# Altium schematic symbol library MicroProcessor.SchLib: 9 symbols (part 2 of 4)
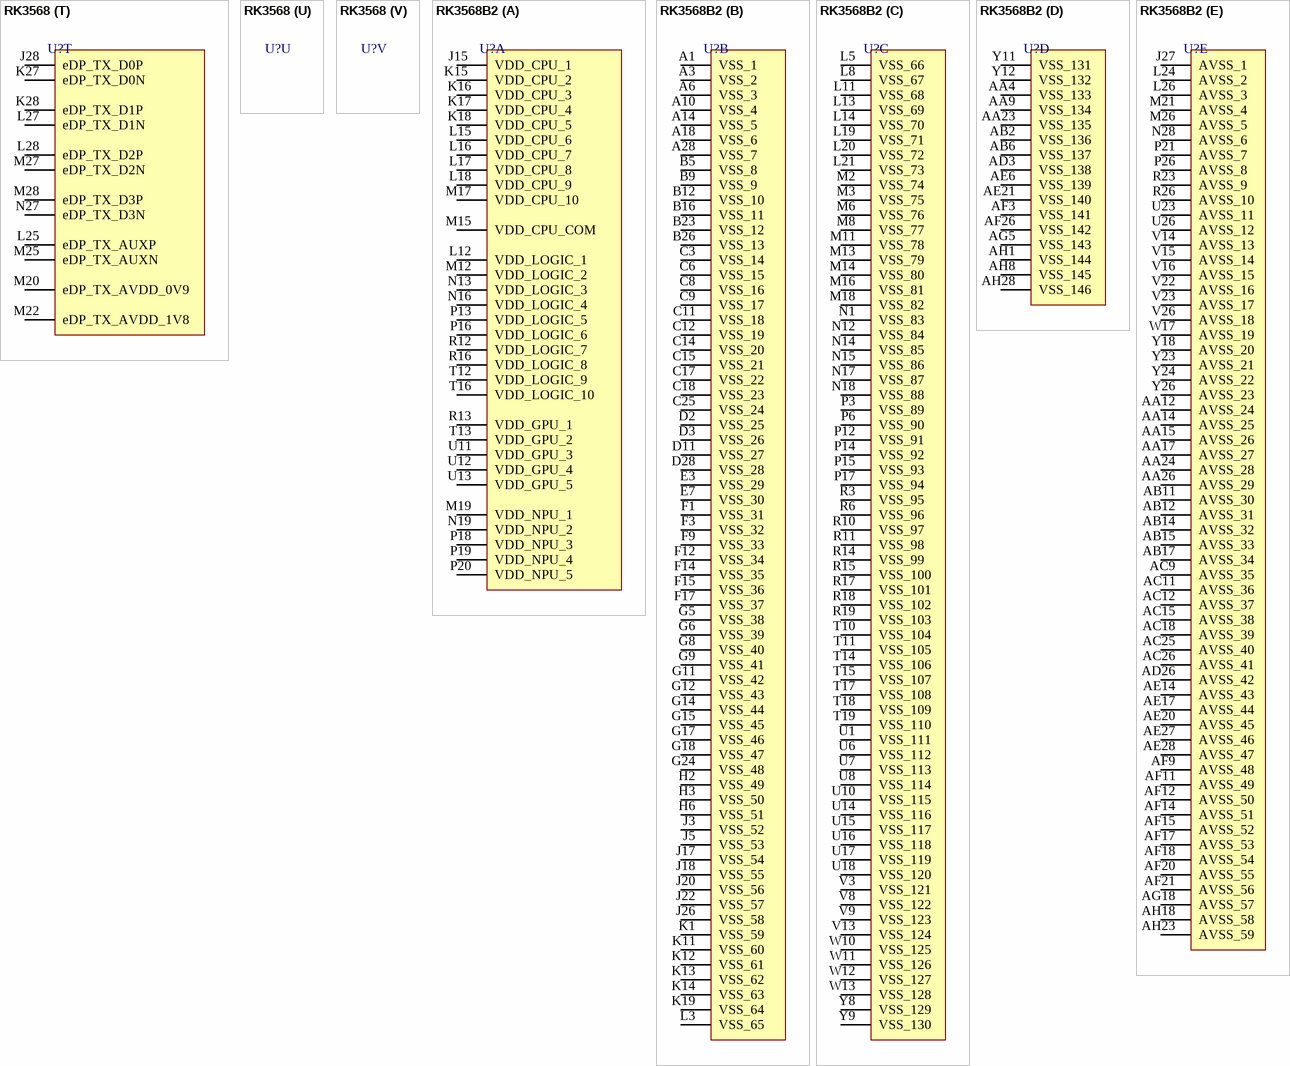
[diagram p30: symbols RK3568 to RK3568B2]

## RK3568
designator U?
RK3568 Power Management IC; Manufacturer: Rockchip; Manufacturer Part Number: RK3568; Package: FCBGA636L; Item Type: IC
part A pins: J15  VDD_CPU_1 , K15  VDD_CPU_2, K16 VDD_CPU_3, K17 VDD_CPU_4, K18 VDD_CPU_5, L12 VDD_LOGIC_1, L15 VDD_CPU_6, L16 VDD_CPU_7, L17 VDD_CPU_8, L18 VDD_CPU_9, M12 VDD_LOGIC_2, M15 VDD_CPU_COM, M17 VDD_CPU_10, M19 VDD_NPU_1, N13 VDD_LOGIC_3, N16 VDD_LOGIC_4, N19 VDD_NPU_2, P13 VDD_LOGIC_5, P16 VDD_LOGIC_6, P18 VDD_NPU_3, P19 VDD_NPU_4, P20 VDD_NPU_5, R12 VDD_LOGIC_7, R13 VDD_GPU_1, R16 VDD_LOGIC_8, T12 VDD_LOGIC_9, T13 VDD_GPU_2, T16 VDD_LOGIC_10, U11 VDD_GPU_3, U12 VDD_GPU_4, U13 VDD_GPU_5
part B pins: A1 VSS_1, A3 VSS_2, A6 VSS_3, A10 VSS_4, A14 VSS_5, A18 VSS_6, A28 VSS_7, B5 VSS_8, B9 VSS_9, B12 VSS_10, B16 VSS_11, B23 VSS_12, B26 VSS_13, C3 VSS_14, C6 VSS_15, C8 VSS_16, C9 VSS_17, C11 VSS_18, C12 VSS_19, C14 VSS_20, C15 VSS_21, C17 VSS_22, C18 VSS_23, C25 VSS_24, D2 VSS_25, D3 VSS_26, D11 VSS_27, D28 VSS_28, E3 VSS_29, E7 VSS_30, F1 VSS_31, F3 VSS_32, F9 VSS_33, F12 VSS_34, F14 VSS_35, F15 VSS_36, F17 VSS_37, G5 VSS_38, G6 VSS_39, G8 VSS_40, G9 VSS_41, G11 VSS_42, G12 VSS_43, G14 VSS_44, G15 VSS_45, G17 VSS_46, G18 VSS_47, G24 VSS_48, H2 VSS_49, H3 VSS_50, H6 VSS_51, J3 VSS_52, J5 VSS_53, J17 VSS_54, J18 VSS_55, J20 VSS_56, J22 VSS_57, J26 VSS_58, K1 VSS_59, K11 VSS_60, K12 VSS_61, K13 VSS_62, K14 VSS_63, K19 VSS_64, L3 VSS_65
part C pins: L5 VSS_66, L8 VSS_67, L11 VSS_68, L13 VSS_69, L14 VSS_70, L19 VSS_71, L20 VSS_72, L21 VSS_73, M2 VSS_74, M3 VSS_75, M6 VSS_76, M8 VSS_77, M11 VSS_78, M13 VSS_79, M14 VSS_80, M16 VSS_81, M18 VSS_82, N1 VSS_83, N12 VSS_84, N14 VSS_85, N15 VSS_86, N17 VSS_87, N18 VSS_88, P3 VSS_89, P6 VSS_90, P12 VSS_91, P14 VSS_92, P15 VSS_93, P17 VSS_94, R3 VSS_95, R6 VSS_96, R10 VSS_97, R11 VSS_98, R14 VSS_99, R15 VSS_100, R17 VSS_101, R18 VSS_102, R19 VSS_103, T10 VSS_104, T11 VSS_105, T14 VSS_106, T15 VSS_107, T17 VSS_108, T18 VSS_109, T19 VSS_110, U1 VSS_111, U6 VSS_112, U7 VSS_113, U8 VSS_114, U10 VSS_115, U14 VSS_116, U15 VSS_117, U16 VSS_118, U17 VSS_119, U18 VSS_120, V3 VSS_121, V8 VSS_122, V9 VSS_123, V13 VSS_124, W10 VSS_125, W11 VSS_126, W12 VSS_127, W13 VSS_128, Y8 VSS_129, Y9 VSS_130
part D pins: AA4 VSS_133, AA9 VSS_134, AA23 VSS_135, AB2 VSS_136, AB6 VSS_137, AD3 VSS_138, AE6 VSS_139, AE21 VSS_140, AF3 VSS_141, AF26 VSS_142, AG5 VSS_143, AH1 VSS_144, AH8 VSS_145, AH28 VSS_146, Y11 VSS_131, Y12 VSS_132
part E pins: AA12 AVSS_24, AA14 AVSS_25, AA15 AVSS_26, AA17 AVSS_27, AA24 AVSS_28, AA26 AVSS_29, AB11 AVSS_30, AB12 AVSS_31, AB14 AVSS_32, AB15 AVSS_33, AB17 AVSS_34, AC9 AVSS_35, AC11 AVSS_36, AC12 AVSS_37, AC15 AVSS_38, AC18 AVSS_39, AC25 AVSS_40, AC26 AVSS_41, AD26 AVSS_42, AE14 AVSS_43, AE17 AVSS_44, AE20 AVSS_45, AE27 AVSS_46, AE28 AVSS_47, AF9 AVSS_48, AF11 AVSS_49, AF12 AVSS_50, AF14 AVSS_51, AF15 AVSS_52, AF17 AVSS_53, AF18 AVSS_54, AF20 AVSS_55, AF21 AVSS_56, AG18 AVSS_57, AH18 AVSS_58, AH23 AVSS_59, J27 AVSS_1, L24 AVSS_2, L26 AVSS_3, M21 AVSS_4, M26 AVSS_5, N28 AVSS_6, P21 AVSS_7, P26 AVSS_8, R23 AVSS_9, R26 AVSS_10, U23 AVSS_11, U26 AVSS_12, V14 AVSS_13, V15 AVSS_14, V16 AVSS_15, V22 AVSS_16, V23 AVSS_17, V26 AVSS_18, W17 AVSS_19, Y18 AVSS_20, Y23 AVSS_21, Y24 AVSS_22, Y26 AVSS_23
part F pins: A2 DDR4_CS0n    / LPDDR4_CS0n_A       / DDR3_ODT1     / LPDDR3_ODT0        / AC25, A4 DDR4_CLKN   / LPDDR4_CLKN_A    / DDR3_CLKN    / LPDDR3_CLKN    /    AC24, A5 DDR4_A9   / LPDDR4_CLKN_B            / DDR3_A5       / -------- --------- /       AC9, A7 DDR4_A6    / LPDDR4_A1_B                / DDR3_A13         / LPDDR3_A1        / AC6, A8 DDR4_A7  / LPDDR4_ODT0_CA_B       / DDR3_A8         / ----------------/           AC7, A9 DDR_DQ1_B   / DDR4_DQU5_B    / LPDDR4_DQ1_B    / DDR3_DQ17     / LPDDR3_DQ5, A11 DDR_DQS0P_B / DDR4_DQSU_P_B / LPDDR4_DQS0P_B / DDR3_DQS2P / LPDDR3_DQS0P, A12 DDR_DQ4_B  / DDR4_DQU0_B   / LPDDR4_DQ4_B     / DDR3_DQ20       / LPDDR3_DQ2  , A13 DDR_DQ13_B / DDR4_DQL5_B  / LPDDR4_DQ13_B    / DDR3_DQ29     / LPDDR3_DQ17, A15 DDR_DQS1N_B / DDR4_DQSL_N_B /  LPDDR4_DQS1N_B / DDR3_DQS3N / LPDDR3_DQS2N , A16 DDR_DQ8_B  / DDR4_DQL0_B   / LPDDR4_DQ8_B     / DDR3_DQ24      / LPDDR3_DQ18, A17 DDR_DQ10_B / DDR4_DQL4_B  / LPDDR4_DQ10_B   / DDR3_DQ26     / LPDDR3_DQ22 , B1 DDR4_A2          / LPDDR4_A1_A              /DDR3_A4            / LPDDR3_A6 /      AC2   , B2 DDR4_CS1n / LPDDR4_CS1n_A          / DDR3_CS1n      / LPDDR3_ODT1      / AC26, B3 DDR4_CKE /  LPDDR4_CKE0_A                / DDR3_CKE      / LPDDR3_CKE / AC22, B4 DDR4_CLKP    / LPDDR4_CLKP_A    / DDR3_CLKP     / LPDDR3_CLKP    /   AC23, B6 DDR4_A0       / LPDDR4_CLKP_B        / DDR3_A9           /    ---------- /         AC0, B7 DDR4_A5    / LPDDR4_A5_B                   / DDR3_A11      /  LPDDR3_A2      / AC5, B8 DDR4_A13    / LPDDR4_A0_B            / DDR3_A14       / LPDDR3_A0        /      AC13, B10 DDR_DQ0_B   / DDR4_DQU7_B   / LPDDR4_DQ0_B    / DDR3_DQ16     / LPDDR3_DQ1 , B11 DDR_DQS0N_B / DDR4_DQSU_N_B / LPDDR4_DQS0N_B / DDR3_DQS2N / LPDDR3_DQS0N , B13 DDR_DQ12_B / DDR4_DQL7_B  / LPDDR4_DQ12_B   / DDR3_DQ28     / LPDDR3_DQ16 , B14 DDR_DQ15_B / DDR4_DQL3_B  / LPDDR4_DQ15_B   / DDR3_DQ31     / LPDDR3_DQ21, B15 DDR_DQS1P_B / DDR4_DQSL_P_B / LPDDR4_DQS1P_B / DDR3_DQS3P / LPDDR3_DQS2P , B17 DDR_DQ9_B  / DDR4_DQL2_B   / LPDDR4_DQ9_B     / DDR3_DQ25      / LPDDR3_DQ19 , B18 DDR_DQ11_B / DDR4_DQL6_B  / LPDDR4_DQ11_B   / DDR3_DQ27     / LPDDR3_DQ23, C1 DDR4_A8       / LPDDR4_ODT0_CA_A      / DDR3_A6      / LPDDR3_A9      /   AC8, C2 DDR4_A11     / LPDDR4_A0_A                / DDR3_A7    / LPDDR3_A8      /   AC11, C4 DDR4_A12      / LPDDR4_A3_A            / DDR3_BA2        / ------------------- /     AC12, C5 DDR4_A14_WEn   / LPDDR4_A4_A           / DDR3_A15      / LPDDR3_A5          /  AC14  , D1 DDR_DQ3_A      /  DDR4_DQL6_A      /   LPDDR4_DQ3_A      /  DDR3_DQ3        /  LPDDR3_DQ9 , D5 DDR4_A16_RASn / LPDDR4_A5_A        / DDR3_RASn        / LPDDR3_A7         / AC16, D6 DDR4_A10    / LPDDR4_CKE0_B           / DDR3_A10    / ------------------ /      AC10, D8 DDR4_ODT1 / LPDDR4_CS0n_B        / DDR3_CS0n     / LPDDR3_CS0n         / AC28, D9 DDR4_A4     / LPDDR4_A3_B                / DDR3_BA1       /  LPDDR3_A3      / AC4, D12 DDR_DQ2_B  / DDR4_DQU3_B    / LPDDR4_DQ2_B     / DDR3_DQ18     / LPDDR3_DQ6, D14 DDR_DM0_B / DDR4_DMU_B   / LPDDR4_DM0_B     / DDR3_DM2       / LPDDR3_DM0, D15 DDR_DQ5_B  / DDR4_DQU6_B   / LPDDR4_DQ5_B     / DDR3_DQ21      / LPDDR3_DQ3, D17 DDR_DQ14_B / DDR4_DQL1_B  / LPDDR4_DQ14_B   / DDR3_DQ30     / LPDDR3_DQ20 , E1 DDR_DQ1_A       /  DDR4_DQL2_A       /    LPDDR4_DQ1_A     /   DDR3_DQ1       /   LPDDR3_DQ14 , E2 DDR_DQ2_A       /  DDR4_DQL4_A      /   LPDDR4_DQ2_A      /   DDR3_DQ2       /  LPDDR3_DQ10 , E4 DDR4_A15_CASn / LPDDR4_A2_A          / DDR3_A0       / --- -----------------/        AC15, E6 DDR4_ACTn     / LPDDR4_CKE1_B     / DDR3_CASn          / ----------------/          AC17, E8 DDR4_ODT0 / LPDDR4_CS1n_B       / DDR3_ODT0     / LPDDR3_CS1n       /   AC27, E9 DDR4_BA1       / LPDDR4_A4_B            / DDR3_A12        / LPDDR3_A4      /   AC19, E11 DDR4_BA0    / LPDDR4_A2_B            / DDR3_A1              /-------------- /         AC18, E12 DDR_DQ3_B  / DDR4_DQU1_B   / LPDDR4_DQ3_B     / DDR3_DQ19      / LPDDR3_DQ4 , E14 DDR_DQ7_B  / DDR4_DQU2_B   / LPDDR4_DQ7_B     / DDR3_DQ23      / LPDDR3_DQ0 , E15 DDR_DQ6_B  / DDR4_DQU4_B   / LPDDR4_DQ6_B     / DDR3_DQ22       / LPDDR3_DQ7, E17 DDR_DM1_B / DDR4_DML_B   / LPDDR4_DM1_B    / DDR3_DM3       / LPDDR3_DM2, F2 DDR_DQ0_A       /  DDR4_DQL0_A       /     LPDDR4_DQ0_A    /   DDR3_DQ0       /     LPDDR3_DQ15, F4 DDR4_A3     / LPDDR4_CKE1_A         /  DDR3_A3           /           ----------- /     AC3, F5 DDR4_A1         /  ---- ----- ---------------        / DDR3_A2         /     -- --------  /         AC1, F7 DDR4_BG1   / LPDDR4_ODT1_CA_A       / DDR3_BA0          / ------------- /        AC21, F8 DDR4_BG0     / LPDDR4_ODT1_CA_B      / DDR3_WEn       / --------------/         AC20, F11 DDR4_RESETn / LPDDR4_RESETn       / DDR3_RESETn         /-------------/           AC29, G1 DDR_DQS0P_A  /  DDR4_DQSL_P_A  / LPDDR4_DQS0P_A  / DDR3_DQS0P / LPDDR3_DQS1P, G2 DDR_DQS0N_A  /  DDR4_DQSL_N_A / LPDDR4_DQS0N_A  / DDR3_DQS0N / LPDDR3_DQS1N, H1 DDR_DQ6_A      /  DDR4_DQL3_A     /  LPDDR4_DQ6_A      /  DDR3_DQ6        /  LPDDR3_DQ8  , H4 DDR_DQ7_A      /  DDR4_DQL1_A    /  LPDDR4_DQ7_A       /  DDR3_DQ7       /  LPDDR3_DQ11  , H5 DDR_DM0_A      /  DDR4_DML_A    /  LPDDR4_DM0_A      /  DDR3_DM0      /  LPDDR3_DM1, H7 DDR_RZQ, H9 DDRPHY_VDDQ_1, H11 DDRPHY_VDDQ_2, H12 DDRPHY_VDDQ_3, H14 DDRPHY_VDDQ_4, H15 DDRPHY_VDDQ_5, J1 DDR_DQ4_A      /  DDR4_DQL7_A      /  LPDDR4_DQ4_A       /  DDR3_DQ4        /  LPDDR3_DQ13, J2 DDR_DQ5_A      /  DDR4_DQL5_A     /  LPDDR4_DQ5_A       /  DDR3_DQ5       /      LPDDR3_DQ12 , J4 DDR_DM1_A / DDR4_DMU_A    / LPDDR4_DM1_A     / DDR3_DM1      / LPDDR3_DM3 , J6 DDR_DQ13_A / DDR4_DQU4_A   / LPDDR4_DQ13_A     / DDR3_DQ13    / LPDDR3_DQ31, J7 DDR_DQ14_A / DDR4_DQU6_A   / LPDDR4_DQ14_A   / DDR3_DQ14     / LPDDR3_DQ30, J8 DDR_AVSS, J9 DDRPHY_VDDQ_6, J11 DDRPHY_VDDQL_1, J12 DDRPHY_VDDQL_2, J14 DDRPHY_VDDQL_3, K2 DDR_DQ12_A / DDR4_DQU2_A    / LPDDR4_DQ12_A     / DDR3_DQ12    / LPDDR3_DQ26, K10 DDRPHY_VDDQL_4, L1 DDR_DQS1N_A / DDR4_DQSU_N_A / LPDDR4_DQS1N_A / DDR3_DQS1N / LPDDR3_DQS3N , L2 DDR_DQS1P_A / DDR4_DQSU_P_A / LPDDR4_DQS1P_A / DDR3_DQS1P / LPDDR3_DQS3P, L4 DDR_DQ15_A / DDR4_DQU0_A   / LPDDR4_DQ15_A   / DDR3_DQ15    / LPDDR3_DQ27, L6 DDR_DQ11_A  / DDR4_DQU5_A     / LPDDR4_DQ11_A    / DDR3_DQ11   / LPDDR3_DQ29, L7 DDR_DQ10_A  / DDR4_DQU7_A     / LPDDR4_DQ10_A    / DDR3_DQ10    / LPDDR3_DQ28, L9 DDRPHY_VDDQ_7, L10 DDRPHY_VDDQL_5, M1 DDR_DQ8_A     / DDR4_DQU3_A      / LPDDR4_DQ8_A      / DDR3_DQ8    / LPDDR3_DQ25, M4 DDR_ECC_DQ1   / DDR4_ECC_DQ0 /     --               / DDR3_ECC_DQ1, M5 DDR_ECC_DQ2   / DDR4_ECC_DQ2 /    -- --           / DDR3_ECC_DQ2, M7 DDR_ECC_DQ4   / DDR4_ECC_DQ6 /     ------       / DDR3_ECC_DQ4, M9 DDRPHY_VDDQ_8, M10 DDRPHY_VDDQL_6, N2 DDR_DQ9_A    / DDR4_DQU1_A      / LPDDR4_DQ9_A      / DDR3_DQ9      / LPDDR3_DQ24, P1 DDR_ECC_DQS_N / DDR4_ECC_DQS_N /  ----  / DDR3_ECC_DQS_N, P2 DDR_ECC_DQS_P / DDR4_ECC_DQS_P /  ----  / DDR3_ECC_DQS_P, P4 DDR_ECC_DQ6   / DDR4_ECC_DQ3 /  -----------  / DDR3_ECC_DQ6, P5 DDR_ECC_DQ0   / DDR4_ECC_DQ7 /           --           / DDR3_ECC_DQ0 /        , P7 DDR_ECC_DM   / DDR4_ECC_DM   /     -------      / DDR3_ECC_DM, P8 DDR_VREFOUT, R4 DDR_ECC_DQ7   / DDR4_ECC_DQ5 /  ----------   / DDR3_ECC_DQ7, R5 DDR_ECC_DQ3   / DDR4_ECC_DQ1 /     -------      / DDR3_ECC_DQ3, R7 DDR_ECC_DQ5   / DDR4_ECC_DQ4 / ------------ / DDR3_ECC_DQ5
part G pins: AA20 I2C2_SDA_M0      / SPI0_MOSI_M0      / PCIE20_PERSTn_M0       / PWM2_M1              /    GPIO0_B6_u, AA22 GPIO0_A3_u, AB20 I2C1_SDA       / CAN0_RX_M0     / PCIE20_BUTTONRSTn       / MCU_JTAG_TCK    / GPIO0_B4_u, AB21 I2C0_SDA                                                                                                                                    GPIO0_B2_u, AB23 GPIO0_D4_d, AB24 TVSS, AC20 UART2_RX_M0 / GPIO0_D0_u, AC21 PWM6     /     SPI0_MISO_M0     /     PCIE30X2_WAKEn_M0                                                     /  GPIO0_C5_d, AC22 I2C2_SCL_M0     / SPI0_CLK_M0       / PCIE20_WAKEn_M0        / PWM1_M1             /    GPIO0_B5_u, AC24 GPIO0_D6_d, AD20 PWM7_IR     /      SPI0_CS0_M0      /     PCIE30X2_PERSTn_M0                                                  / GPIO0_C6_d, AD21 PWM5    /   SPI0_CS1_M0       /   UART0_RTSn                                                                              /   GPIO0_C4_d, AD22 PWM1_M0        /    GPUAVS    /         UART0_RX   /                                                                    GPIO0_C0_d, AD23 CLK32K_IN     /  CLK32K_OUT0            /  PCIE30X2_BUTTONRSTn                       /      GPIO0_B0_u    , AD25 GPIO0_D5_d, AE23 PWM4   /   VOP_PWM_M0      /      PCIE30X1_PERSTn_M0     /   MCU_JTAG_TRSTn    /   GPIO0_C3_d, AE24  GPU_PWREN          / SATA_CP_POD            / PCIE30X2_CLKREQn_M0                  /    GPIO0_A6_d     , AE26 GPIO0_D3_d, AF23 PWM2_M0           / NPUAVS            / UART0_TX                              /   MCU_JTAG_TDI       /   GPIO0_C1_d, AF24 I2C0_SCL                                                                                                                                    GPIO0_B1_u, AF25 SDMMC0_PWREN / SATA_MP_SWITCH  / PCIE20_CLKREQn_M0                       /    GPIO0_A5_d, AF27 XOUT24M, AF28 XIN24M, AG23 PWM3_IR    /    EDP_HPDIN_M1   /    PCIE30X1_WAKEn_M0   /    MCU_JTAG_TMS    /    GPIO0_C2_d, AG24 I2C1_SCL       /  CAN0_TX_M0   /  PCIE30X1_BUTTONRSTn  /  MCU_JTAG_TDO   / GPIO0_B3_u, AG25 FLASH_VOL_SEL   /    GPIO0_A7_u, AG26 TSADC_SHUT_M0   /  TSADC_SHUT_ORG        /    GPIO0_A1_z, AG27 REFCLK_OUT      /   GPIO0_A0_d, AG28 PMIC_SLEEP     /  TSADC_SHUT_M1            /     GPIO0_A2_d, AH24 UART2_TX_M0 / GPIO0_D1_u, AH25 HDMITX_CEC_M1   / PWM0_M1               / UART0_CTSN                                                                  / GPIO0_C7_d, AH26 PWM0_M0      /     CPUAVS    /                                                                                                      GPIO0_B7_d, AH27 NPOR_u, N10 SYSPLL_AVDD_1V8, N11 SYSPLL_AVSS, P11 SYSPLL_AVDD_0V9, V19 PMU_VDD_LOGIC_0V9, V20 PMUPLL_AVSS, V21 PMUPLL_AVDD_0V9, W19 PMUIO2, Y20 PMUIO1, Y21 PMUPLL_AVDD_1V8, Y22 SDMMC0_DET       /  SATA_CP_DET      /  PCIE30X1_CLKREQn_M0                      /   GPIO0_A4_u
part H pins: A19 I2S1_MCLK_M0      / UART3_RTSn_M0       /  SCR_CLK       / PCIE30X1_PERSTn_M2                                                         /   GPIO1_A2_d, A20 I2S1_LRCK_TX_M0 / UART4_RTSn_M0         / SCR_RST     / PCIE30X1_CLKREQn_M2 / ---------/ ACODEC_DAC_SYNC / GPIO1_A5_d, A21 I2S1_SDO3_M0      / I2S1_SDI1_M0        / PDM_SDI1_M0      / PCIE20_PERSTn_M2                                                                      /    GPIO1_B2_d, B19 I2S1_SCLK_TX_M0      / UART3_CTSn_M0      / SCR_IO            /  PCIE30X1_WAKEn_M2      / ACODEC_DAC_CLK          / GPIO1_A3_d, B20  I2S1_SDO0_M0       / UART4_CTSn_M0      / SCR_DET                        / AUDIOPWM_ROUT_N / ACODEC_DAC_DATAL / GPIO1_A7_d, B21 I2S1_SDI0_M0     /     PDM_SDI0_M0                                                                                                                        /  GPIO1_B3_d, C20 I2S1_LRCK_RX_M0 / UART4_TX_M0 / PDM_CLK0_M0                                                                    / AUDIOPWM_ROUT_P /  GPIO1_A6_d, D18 I2C3_SDA_M0         / UART3_RX_M0        / CAN1_RX_M0        / AUDIOPWM_LOUT_P     / ACODEC_ADC_DATA     / GPIO1_A0_u, D20 I2S1_SDO1_M0     / I2S1_SDI3_M0     / PDM_SDI3_M0     /  PCIE20_CLKREQn_M2                      / ACODEC_DAC_DATAR / GPIO1_B0_d, E18 I2C3_SCL_M0        / UART3_TX_M0         / CAN1_TX_M0    / AUDIOPWM_LOUT_N        / ACODEC_ADC_CLK        /  GPIO1_A1_u, E20 I2S1_SDO2_M0    / I2S1_SDI2_M0    / PDM_SDI2_M0     / PCIE20_WAKEn_M2                                / ACODEC_ADC_SYNC  /GPIO1_B1_d, F18 I2S1_SCLK_RX_M0       / UART4_RX_M0         / PDM_CLK1_M0                                               / SPDIF_TX_M0                       /  GPIO1_A4_d, H17 VCCIO1
part I pins: A22 FSPI_CLK      / FLASH_ALE     /  GPIO1_D0_d, A23 EMMC_CLKOUT                                          / FLASH_DQS     / GPIO1_C5_d, A24 EMMC_D0                                                      / FLASH_D0       /  GPIO1_B4_u, A25 EMMC_D4                                                      / FLASH_D4       /  GPIO1_C0_u, A26 EMMC_DATA_STROBE     / FSPI_CS1n    / FLASH_CLE    / GPIO1_C6_d, A27 FSPI_D3        / FLASH_CS1n       /GPIO1_D4_u, B22 EMMC_CMD                                                 / FLASH_WRn    /  GPIO1_C4_u, B24 EMMC_D2                                                     / FLASH_D2        /  GPIO1_B6_u, B25 EMMC_D7                                                      / FLASH_D7       /  GPIO1_C3_u, C21 EMMC_D1                                                      / FLASH_D1        / GPIO1_B5_u, C23 FSPI_CS0n     / FLASH_CS0n     / GPIO1_D3_u, C24 FSPI_D0         / FLASH_RDY      / GPIO1_D1_u, D21 EMMC_D3                                                      / FLASH_D3        / GPIO1_B7_u, D23 FSPI_D1        / FLASH_RDn        / GPIO1_D2_u, E21 EMMC_D5                                                      / FLASH_D5        / GPIO1_C1_u, E22 EMMC_D6                                                      / FLASH_D6        / GPIO1_C2_u, F20 EMMC_RSTn                       / FSPI_D2        / FLASH_WPn     /  GPIO1_C7_d, H18 VCCIO2
part J pins: H26 SDMMC0_D2 / ARMJTAG_TCK / UART5_CTSn_M0                              / GPIO1_D7_u, H27 SDMMC0_CMD  / PWM10_M1       / UART5_RX_M0     / CAN0_TX_M1     / GPIO2_A1_u, H28 SDMMC0_CLK / TEST_CLKOUT    / UART5_TX_M0     / CAN0_RX_M1     /GPIO2_A2_d, J23 SDMMC0_D3 / ARMJTAG_TMS / UART5_RTSn_M0                              /  GPIO2_A0_u, J24 SDMMC0_D1     / UART2_RX_M1    / UART6_RX_M1    / PWM9_M1     / GPIO1_D6_u, J25 SDMMC0_D0      / UART2_TX_M1   /  UART6_TX_M1   / PWM8_M1     / GPIO1_D5_u, L22 VCCIO3
part K pins: B28 SDMMC1_D2 /GMAC0_RXCLK  / UART7_RX_M0                                             / GPIO2_A5_u, C27 SDMMC1_D3 /    GMAC0_TXD2 / UART7_TX_M0                                             /  GPIO2_A6_u, C28 SDMMC1_CMD / GMAC0_TXD3 / UART9_RX_M0                                             / GPIO2_A7_u, D26 SDMMC1_PWREN     /  I2C4_SDA_M1     /  UART8_RTSn_M0     /  CAN2_RX_M1    / GPIO2_B1_d, D27 SDMMC1_CLK / GMAC0_TXCLK / UART9_TX_M0                                             / GPIO2_B0_d, E25 SDMMC1_DET      / I2C4_SCL_M1       / UART8_CTSn_M0      / CAN2_TX_M1     /  GPIO2_B2_u, E26 CLK32K_OUT1                                                   / UART8_RX_M0             / SPI1_CS1_M0                    /GPIO2_C6_d, E27 SDMMC1_D0   / GMAC0_RXD2 / UART6_RX_M0                                             /  GPIO2_A3_u, E28 SDMMC1_D1   / GMAC0_RXD3 / UART6_TX_M0                                             /  GPIO2_A4_u, F24 I2S2_LRCK_RX_M0 / GMAC0_RXDV_CRS / UART6_CTSn_M0         / SPI1_CS0_M0             / GPIO2_C0_d, F25 I2S2_SCLK_TX_M0 / GMAC0_MCLKINOUT   / UART7_CTSn_M0           / SPI2_MISO_M0         / GPIO2_C2_d, F26 I2S2_SDI_M0       / GMAC0_RXER               / UART8_TX_M0                   / SPI2_CS1_M0            /  GPIO2_C5_d, F27 GMAC0_RXD0     / UART1_CTSn_M0          / SPI1_MISO_M0        /GPIO2_B6_u, F28 GMAC0_TXD0  / UART1_RX_M0                                                 /  GPIO2_B3_u, G23 I2S2_MCLK_M0 / ETH0_REFCLKO_25M   / UART7_RTSn_M0         / SPI2_CLK_M0           / GPIO2_C1_d, G27 GMAC0_TXD1 / UART1_TX_M0                                                   /  GPIO2_B4_u, G28 GMAC0_TXEN    / UART1_RTSn_M0          / SPI1_CLK_M0        / GPIO2_B5_u, H23 I2S2_SDO_M0           / GMAC0_MDIO            /   UART9_CTSn_M0             / SPI2_CS0_M0            / GPIO2_C4_d, H24 I2S2_LRCK_TX_M0  / GMAC0_MDC                / UART9_RTSn_M0              / SPI2_MOSI_M0        / GPIO2_C3_d, H25 I2S2_SCLK_RX_M0  / GMAC0_RXD1     / UART6_RTSn_M0         / SPI1_MOSI_M0         / GPIO2_B7_d, J21 VCCIO4
part L pins: AA7 LCDC_VSYNC   / VOP_BT1120_D14   /  SPI1_MISO_M1   / UART5_TX_M1   / I2S1_SDO3_M2   / GPIO3_C2_d, AB8 LCDC_D8   / VOP_BT1120_D0     /  SPI1_CS0_M1    / PCIE30X1_PERSTn_M1   / SDMMC2_D0_M1   /    GPIO3_A1_d, AC2 PWM15_IR_M0 / SPDIF_TX_M1 / GMAC1_MDIO_M0 / UART7_RX_M1 / I2S1_LRCK_RX_M2 /  GPIO3_C5_d, AC3 PWM14_M0   / VOP_PWM_M1   / GMAC1_MDC_M0   / UART7_TX_M1   / PDM_CLK1_M2   / GPIO3_C4_d, AC4 LCDC_DEN   / VOP_BT1120_D15    / SPI1_CLK_M1   / UART5_RX_M1   / I2S1_SCLK_RX_M2    /  GPIO3_C3_d, AC7 LCDC_D3   /  VOP_BT656_D3_M0      / SPI0_CLK_M1   /  PCIE30X1_WAKEn_M1      / I2S1_SDI0_M2          / GPIO2_D3_d, AC8 LCDC_D2  /  VOP_BT656_D2_M0    /  SPI0_CS0_M1   / PCIE30X1_CLKREQn_M1 / I2S1_LRCK_TX_M2 /  GPIO2_D2_d, AD1 LCDC_HSYNC   / VOP_BT1120_D13   / SPI1_MOSI_M1   / PCIE20_PERSTn_M1   / I2S1_SDO2_M2   / GPIO3_C1_d, AD2 LCDC_D23 / PWM13_M0 / GMAC1_MCLKINOUT_M0/-------------------- / UART3_RX_M1 / PDM_SDI3_M2 /  GPIO3_C0_d, AD4 LCDC_D22 / PWM12_M0 / GMAC1_TXEN_M0 /-----------------------/ UART3_TX_M1 / PDM_SDI2_M2 / GPIO3_B7_d, AD6 LCDC_D6   / VOP_BT656_D6_M0     / SPI2_MOSI_M1        / PCIE30X2_PERSTn_M1      / I2S1_SDI3_M2      /  GPIO2_D6_d, AD7 LCDC_D1  /  VOP_BT656_D1_M0   /  SPI0_MOSI_M1     /  PCIE20_WAKEn_M1    / I2S1_SCLK_TX_M2  /  GPIO2_D1_d, AE1 LCDC_D19 / VOP_BT1120_D10 /GMAC1_RXER_M0 /-----------------   / I2C5_SDA_M0  / PDM_SDI1_M2  / GPIO3_B4_d, AE2 LCDC_D20 / VOP_BT1120_D11 / GMAC1_TXD0_M0 /---------------------/ I2C3_SCL_M1   / PWM10_M0   /  GPIO3_B5_d, AE3 LCDC_D21 / VOP_BT1120_D12 / GMAC1_TXD1_M0/-------------------- / I2C3_SDA_M1 / PWM11_IR_M0 / GPIO3_B6_d, AE5 LCDC_D9     / VOP_BT1120_D1     / GMAC1_TXD2_M0     / I2S3_MCLK_M0   / SDMMC2_D1_M1   /  GPIO3_A2_d, AF1 LCDC_D18 / VOP_BT1120_D9 /GMAC1_RXDV_CRS_M0 /--------------  / I2C5_SCL_M0 / PDM_SDI0_M2 /  GPIO3_B3_d, AF2 LCDC_D17    / VOP_BT1120_D8     / GMAC1_RXD1_M0     / UART4_TX_M1 /----------------    / PWM9_M0    / GPIO3_B2_d, AF4 LCDC_D11   /  VOP_BT1120_D3   / GMAC1_RXD2_M0   / I2S3_LRCK_M0   / SDMMC2_D3_M1   /   GPIO3_A4_d, AF5 LCDC_D4  / VOP_BT656_D4_M0   / SPI2_CS1_M1     /   PCIE30X2_CLKREQn_M1    /  I2S1_SDI1_M2        /  GPIO2_D4_d, AF6 LCDC_D5   / VOP_BT656_D5_M0   / SPI2_CS0_M1   /   PCIE30X2_WAKEn_M1           /  I2S1_SDI2_M2       /  GPIO2_D5_d, AG1 LCDC_D16     / VOP_BT1120_D7     / GMAC1_RXD0_M0    / UART4_RX_M1 /----------------- / PWM8_M0    / GPIO3_B1_d, AG2 LCDC_D15     / VOP_BT1120_D6     / ETH1_REFCLKO_25M_M0 /------------------   / SDMMC2_PWREN_M1    / GPIO3_B0_d, AG3 LCDC_D13    / VOP_BT1120_CLK    / GMAC1_TXCLK_M0    / I2S3_SDI_M0   / SDMMC2_CLK_M1      /  GPIO3_A6_d, AG4 LCDC_D10   /  VOP_BT1120_D2   / GMAC1_TXD3_M0     / I2S3_SCLK_M0     / SDMMC2_D2_M1     /  GPIO3_A3_d, AG6 LCDC_D0   /  VOP_BT656_D0_M0    /  SPI0_MISO_M1    /  PCIE20_CLKREQn_M1   /  I2S1_MCLK_M2   /  GPIO2_D0_d, AH2 LCDC_D14    / VOP_BT1120_D5   / GMAC1_RXCLK_M0 /-   --------------                     / SDMMC2_DET_M1   /  GPIO3_A7_d, AH3 LCDC_D12   / VOP_BT1120_D4   / GMAC1_RXD3_M0   / I2S3_SDO_M0   / SDMMC2_CMD_M1   /  GPIO3_A5_d, AH4 LCDC_CLK       / VOP_BT656_CLK_M0       / SPI2_CLK_M1         / UART8_RX_M1        / I2S1_SDO1_M2    /  GPIO3_A0_d, AH5 LCDC_D7    / VOP_BT656_D7_M0       / SPI2_MISO_M1                     / UART8_TX_M1        / I2S1_SDO0_M2    /  GPIO2_D7_d, V10 VCCIO5_1, V11 VCCIO5_2
part M pins: AA1 GPIO3_D4_d, AA2 GPIO4_A1_d, AA3 GPIO4_A0_d, AA5 GPIO3_D5_d, AA6 GPIO3_C7_d, AB1 GPIO3_D1_d, AB5 GPIO3_D0_d, AC1 GPIO3_D3_d, AC5 GPIO3_C6_d, R9 VCCIO6_1, U2 GPIO4_C1_d, U3 GPIO4_C0_d, U4 GPIO4_B7_d, U5 GPIO4_B6_d, U9 VCCIO6_2, V1 GPIO4_B3_d, V2 GPIO4_B1_d, V4 GPIO4_B2_d, V5 GPIO4_B5_d, V6 GPIO4_B4_d, V7 GPIO4_B0_d, W1 GPIO4_A7_d, W2 GPIO4_A6_d, Y1 GPIO4_A5_d, Y2 GPIO4_A4_d, Y3 GPIO4_A3_d, Y4 GPIO4_A2_d, Y5 GPIO3_D7_d, Y6 GPIO3_D6_d, Y7 GPIO3_D2_d
part N pins: AA11 GPIO4_C3_d, AB9 GPIO4_D2_d, AD8 GPIO4_C5_d, AE8 GPIO4_C6_d, AF8 GPIO4_C2_d, AG7 GPIO4_D0_u, AG8 GPIO4_C7_u, AH6 GPIO4_D1_u, AH7 GPIO4_C4_d, V12 VCCIO7
part O pins: B27 SARADC_VIN0, C26 SARADC_VIN1, D24 SARADC_VIN2, E23 SARADC_VIN3, F21 SARADC_VIN7, F22 SARADC_VIN5, G20 SARADC_VIN6, G21 SARADC_VIN4, H20 OTP_VCC18, H22 SARADC_AVDD_1V8
part P pins: AD9 MIPI_CSI_RX_D3P, AD11 MIPI_CSI_RX_D2N, AE9 MIPI_CSI_RX_D3N, AE11 MIPI_CSI_RX_D2P, AG9 MIPI_CSI_RX_CLK1P, AG10 MIPI_CSI_RX_CLK0P, AG11 MIPI_CSI_RX_D1P, AG12 MIPI_CSI_RX_D0P, AH9 MIPI_CSI_RX_CLK1N, AH10 MIPI_CSI_RX_CLK0N, AH11 MIPI_CSI_RX_D1N, AH12 MIPI_CSI_RX_D0N, W14 MIPI_CSI_RX_AVDD_0V9, Y14 MIPI_CSI_RX_AVDD_1V8
part Q pins: AA18 HDMI_TX_REXT, AB18 HDMI_TX_HPDIN, AG19 HDMI_TX_CLKN, AG20 HDMI_TX_D0P, AG21 HDMI_TX_D1P, AG22 HDMI_TX_D2P, AH19 HDMI_TX_CLKP, AH20 HDMI_TX_D0N, AH21 HDMI_TX_D1N, AH22 HDMI_TX_D2N, V17 HDMI_TX_AVDD_0V9_1, V18 HDMI_TX_AVDD_0V9_2, W18 HDMI_TX_AVDD_1V8
part R pins: AG13 MIPI_DSI_TX0_D3N/LVDS_TX0_D3N, AG14 MIPI_DSI_TX0_D2N/LVDS_TX0_D2N, AG15 MIPI_DSI_TX0_CLKN/LVDS_TX0_CLKN, AG16 MIPI_DSI_TX0_D1N/LVDS_TX0_D1N, AG17 MIPI_DSI_TX0_D0N/LVDS_TX0_D0N, AH13 MIPI_DSI_TX0_D3P/LVDS_TX0_D3P, AH14 MIPI_DSI_TX0_D2P/LVDS_TX0_D2P, AH15 MIPI_DSI_TX0_CLKP/LVDS_TX0_CLKP, AH16 MIPI_DSI_TX0_D1P/LVDS_TX0_D1P, AH17 MIPI_DSI_TX0_D0P/LVDS_TX0_D0P, W16 MIPI_DSI_TX0/LVDS_TX0_AVDD_0V9, Y17 MIPI_DSI_TX0/LVDS_TX0_AVDD_1V8
part S pins: AC14 MIPI_DSI_TX1_D2N, AC17 MIPI_DSI_TX1_D1N, AD12 MIPI_DSI_TX1_D3P, AD14 MIPI_DSI_TX1_D2P, AD15 MIPI_DSI_TX1_CLKP, AD17 MIPI_DSI_TX1_D1P, AD18 MIPI_DSI_TX1_D0P, AE12 MIPI_DSI_TX1_D3N, AE15 MIPI_DSI_TX1_CLKN, AE18 MIPI_DSI_TX1_D0N, W15 MIPI_DSI_TX1_AVDD_0V9, Y15 MIPI_DSI_TX1_AVDD_1V8
part T pins: J28 eDP_TX_D0P, K27 eDP_TX_D0N, K28 eDP_TX_D1P, L25 eDP_TX_AUXP, L27 eDP_TX_D1N, L28 eDP_TX_D2P, M20 eDP_TX_AVDD_0V9, M22 eDP_TX_AVDD_1V8, M25 eDP_TX_AUXN, M27 eDP_TX_D2N, M28 eDP_TX_D3P, N27 eDP_TX_D3N
part F text: DDR4; LPDDR4; DDR3; LPDDR3; Note:  Sequences can not be swap.
part G text: PMUIO1 Domain; OSC; Operating Voltage=3.3V Only; Operating Voltage =1.8V (PMUPLL_AVDD_1V8); PMU PLL; PMUIO2 Domain; Operating Voltage=1.8V/3.3V; SYS PLL; PMUIO1/2/OSC Domain Logic Power; Operating Voltage=0.9V
part H text: VCCIO1 Domain; Operating Voltage=1.8V/3.3V
part I text: VCCIO2 Domain; Operating Voltage=1.8V/3.3V; Default is determined by Pin; FLASH_VOL_SEL/GPIO0_A7_u:; L:VCCIO2 must supply 3.3V; H:VCCIO2 must supply 1.8V
part J text: VCCIO3 Domain; Operating Voltage=1.8V/3.3V
part K text: VCCIO4 Domain; Operating Voltage=1.8V/3.3V
part L text: VCCIO5 Domain; Operating Voltage=1.8V/3.3V

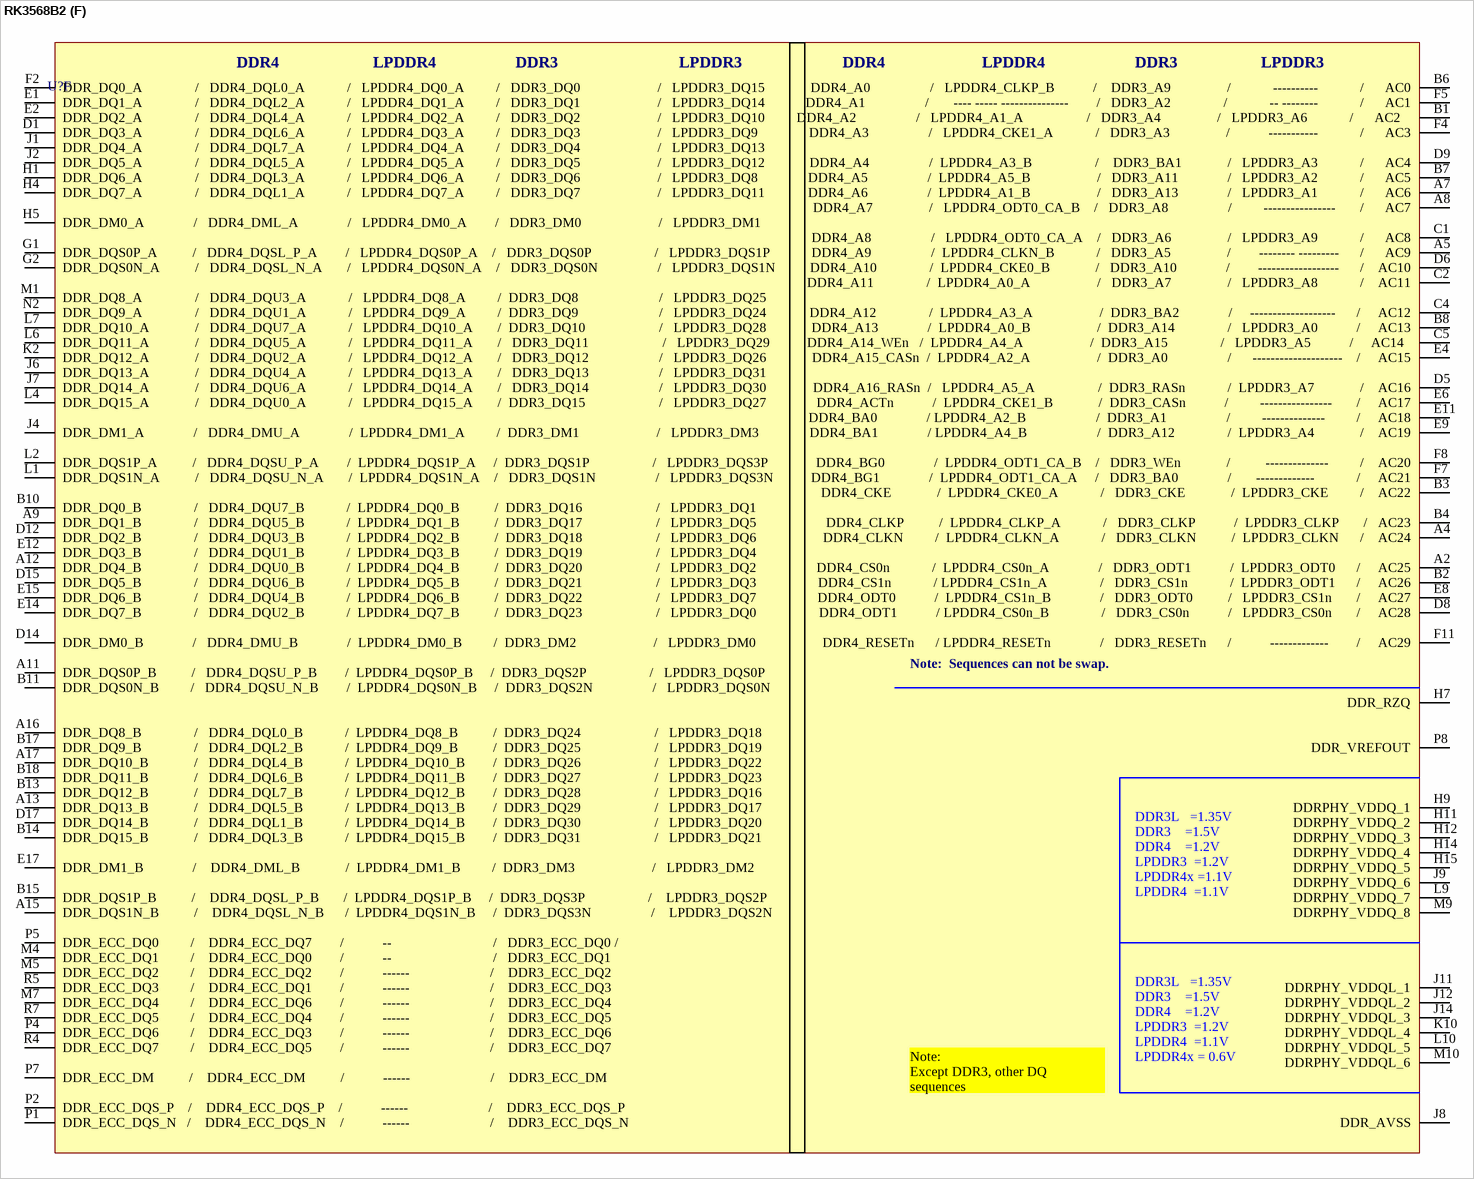
[diagram p14: symbol RK3568B2]

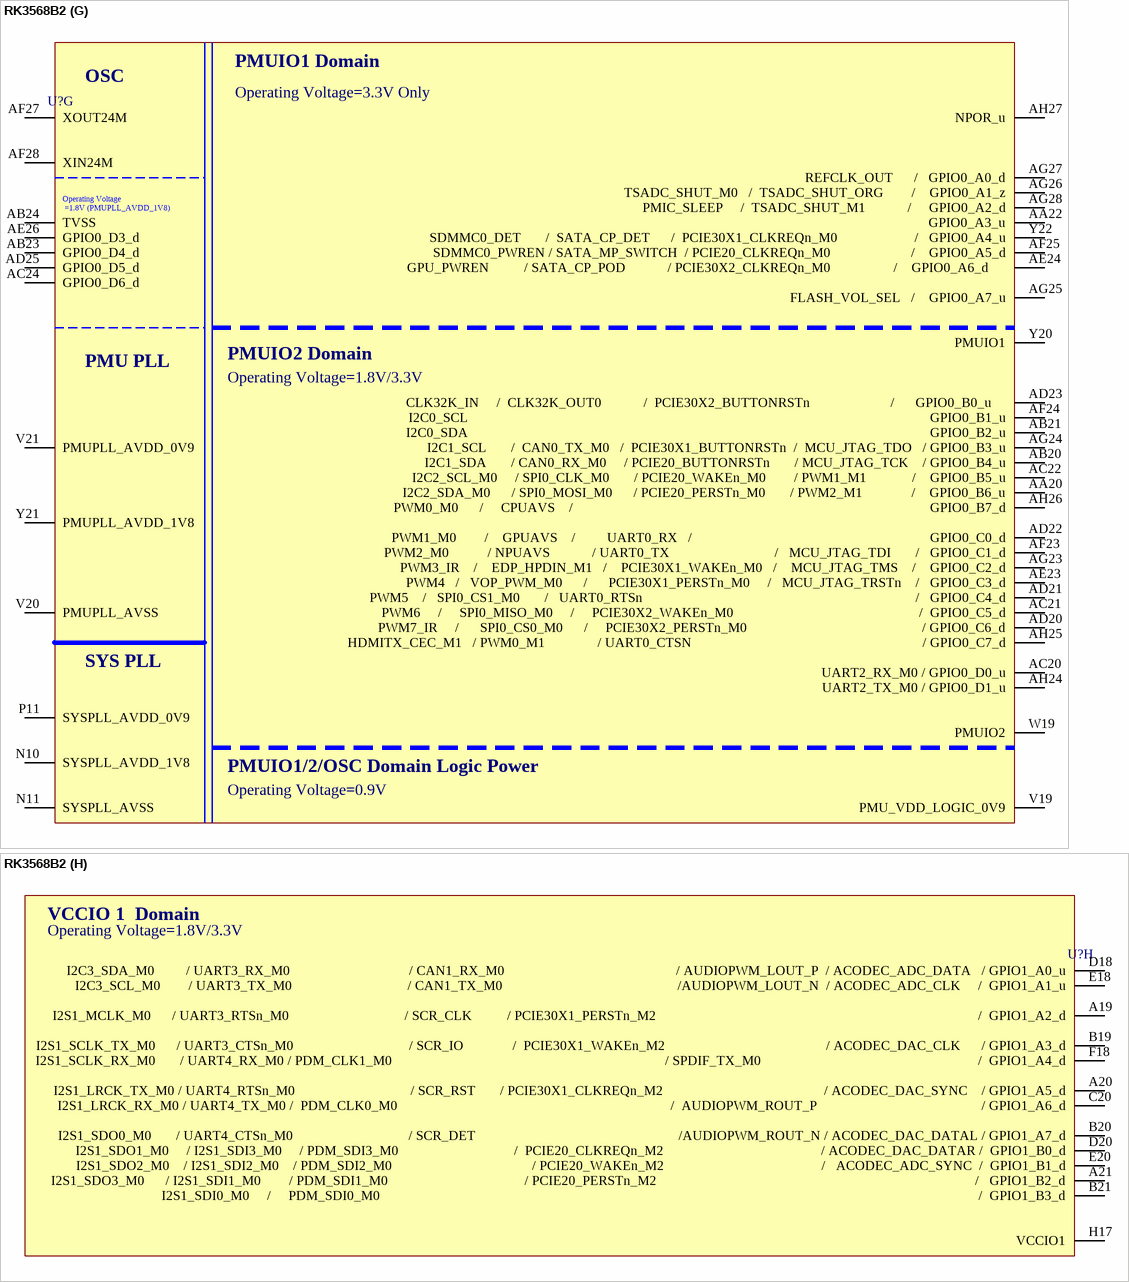
[diagram p15: symbol RK3568B2]

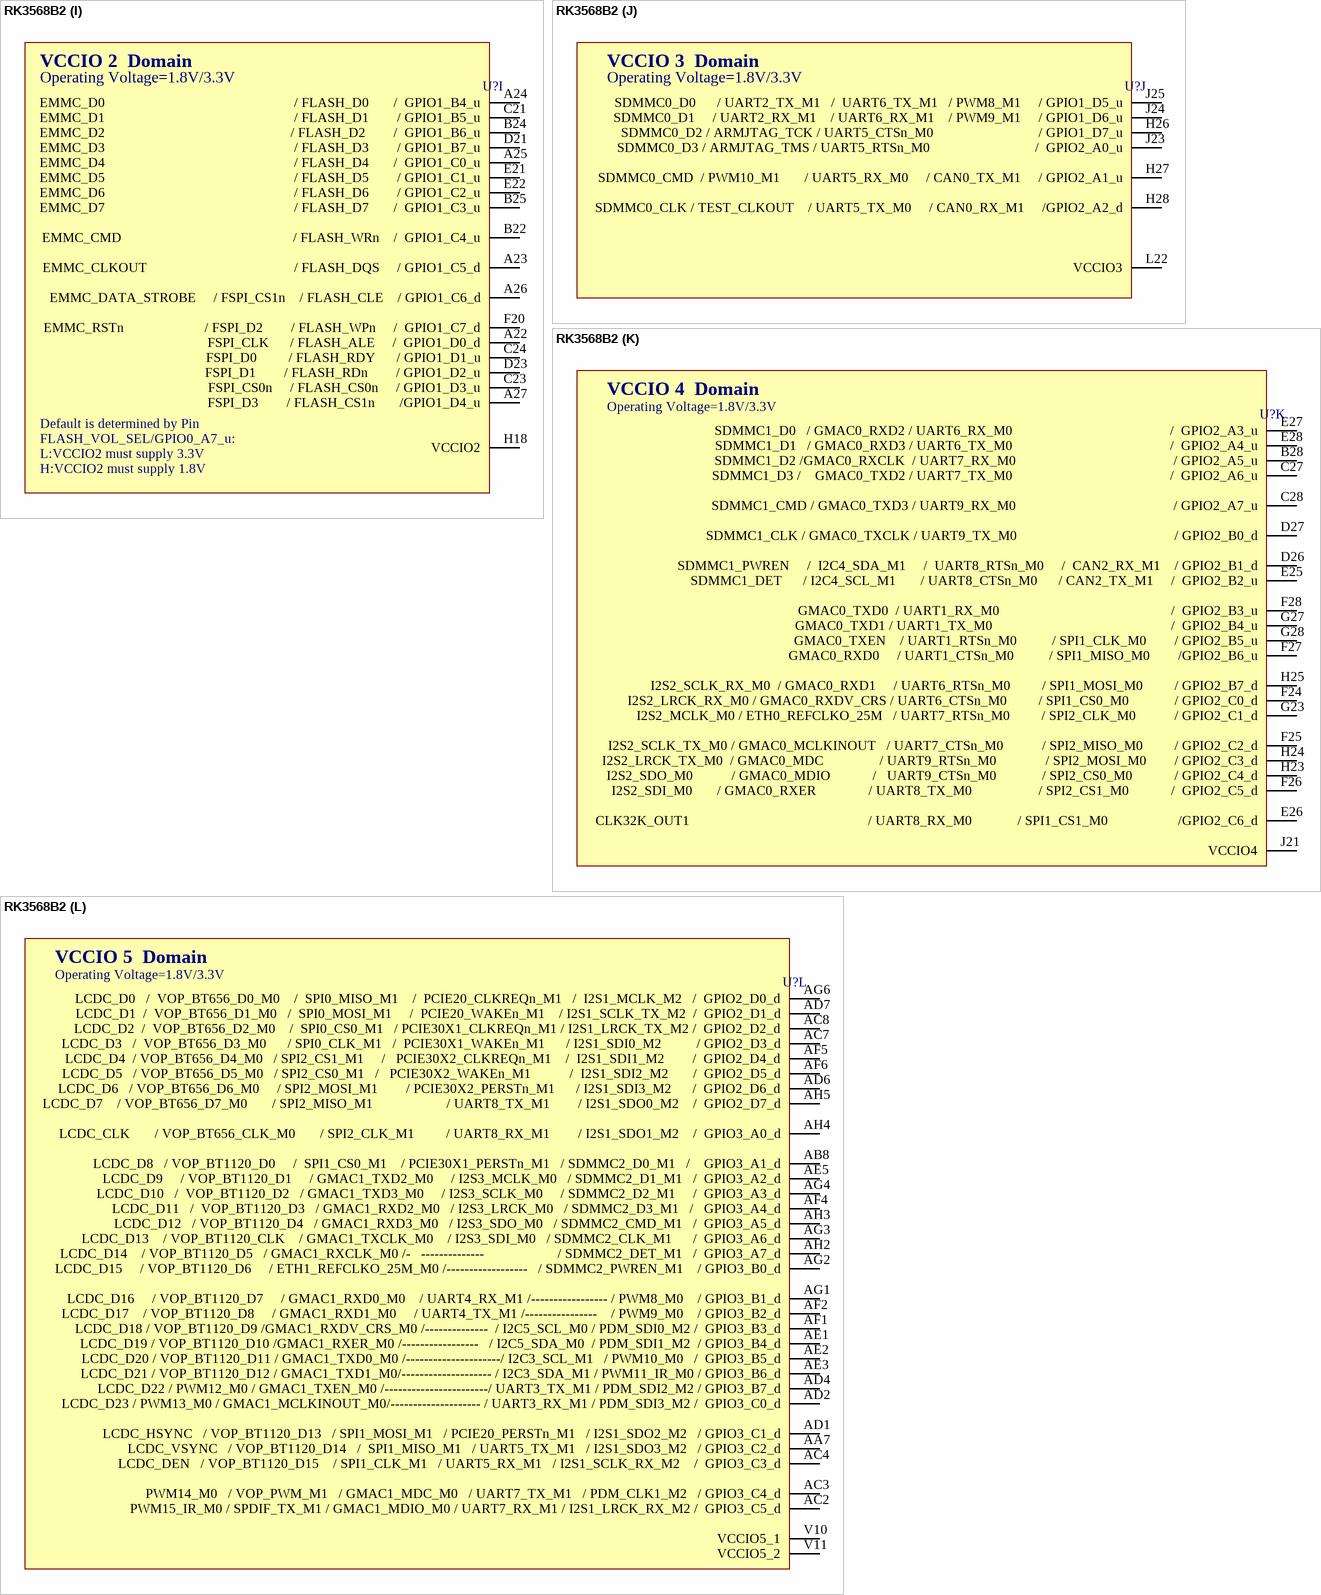
[diagram p16: symbol RK3568B2]

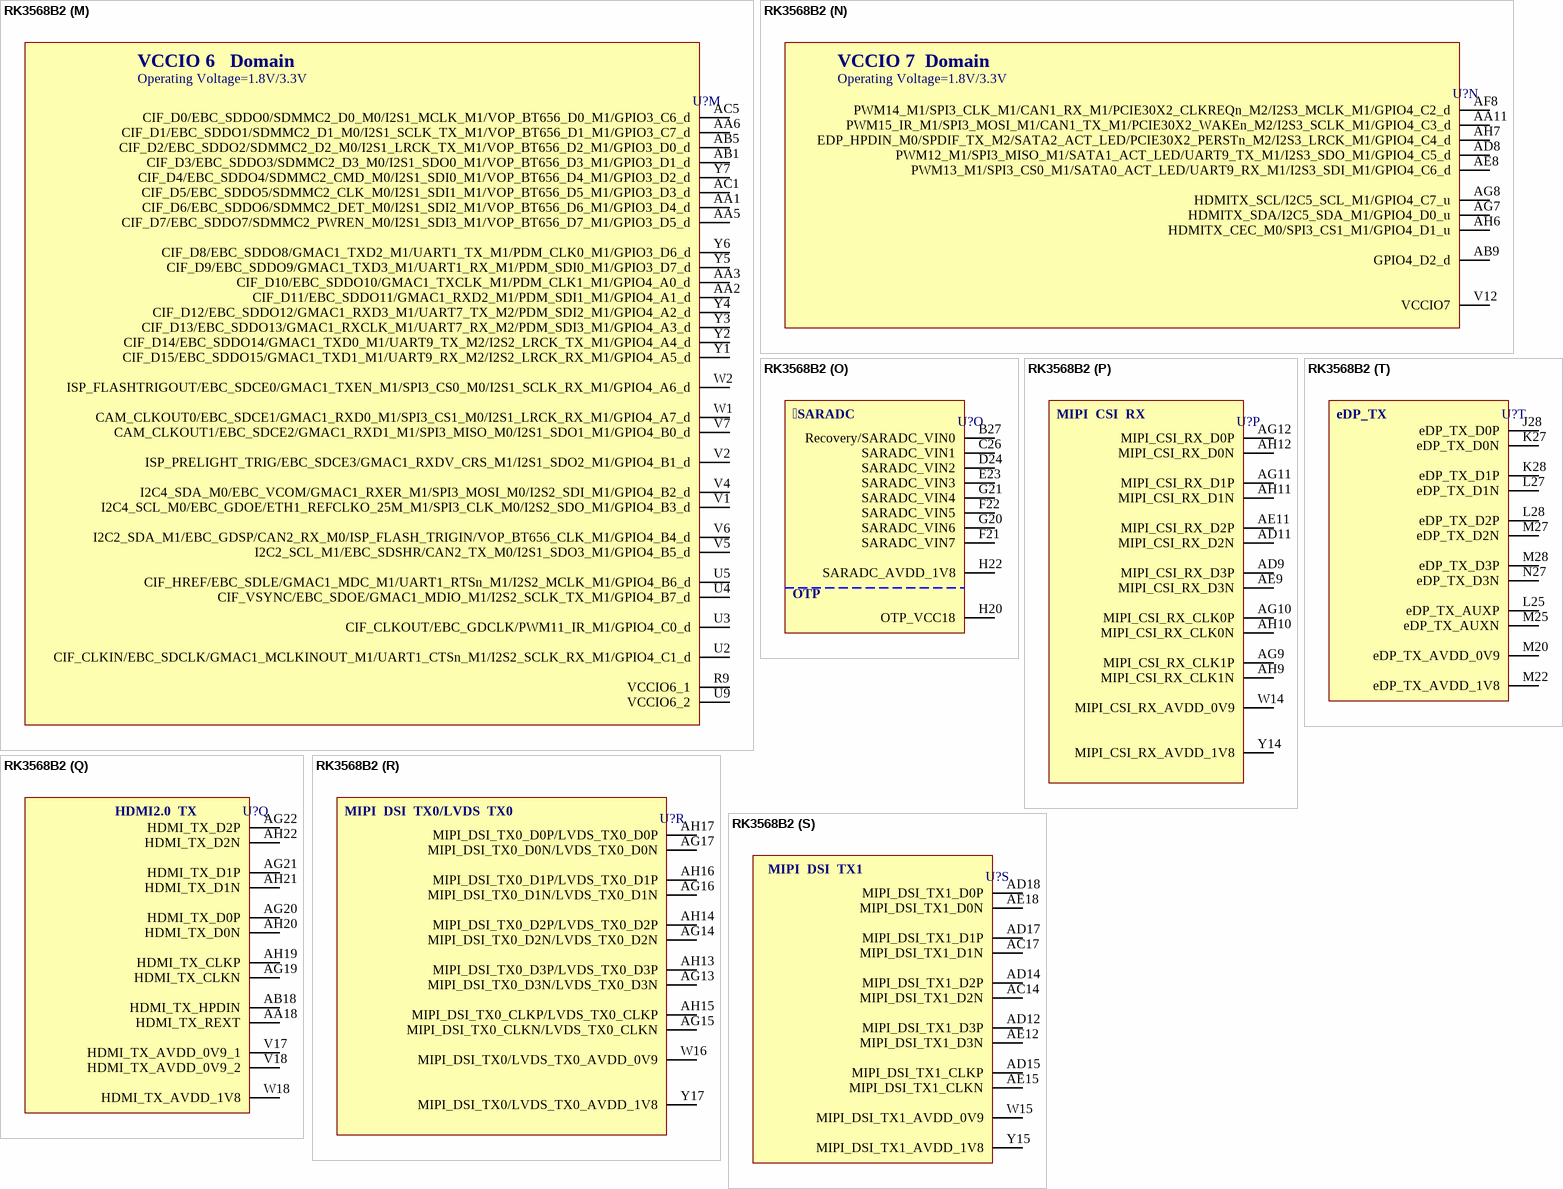
[diagram p17: symbol RK3568B2]

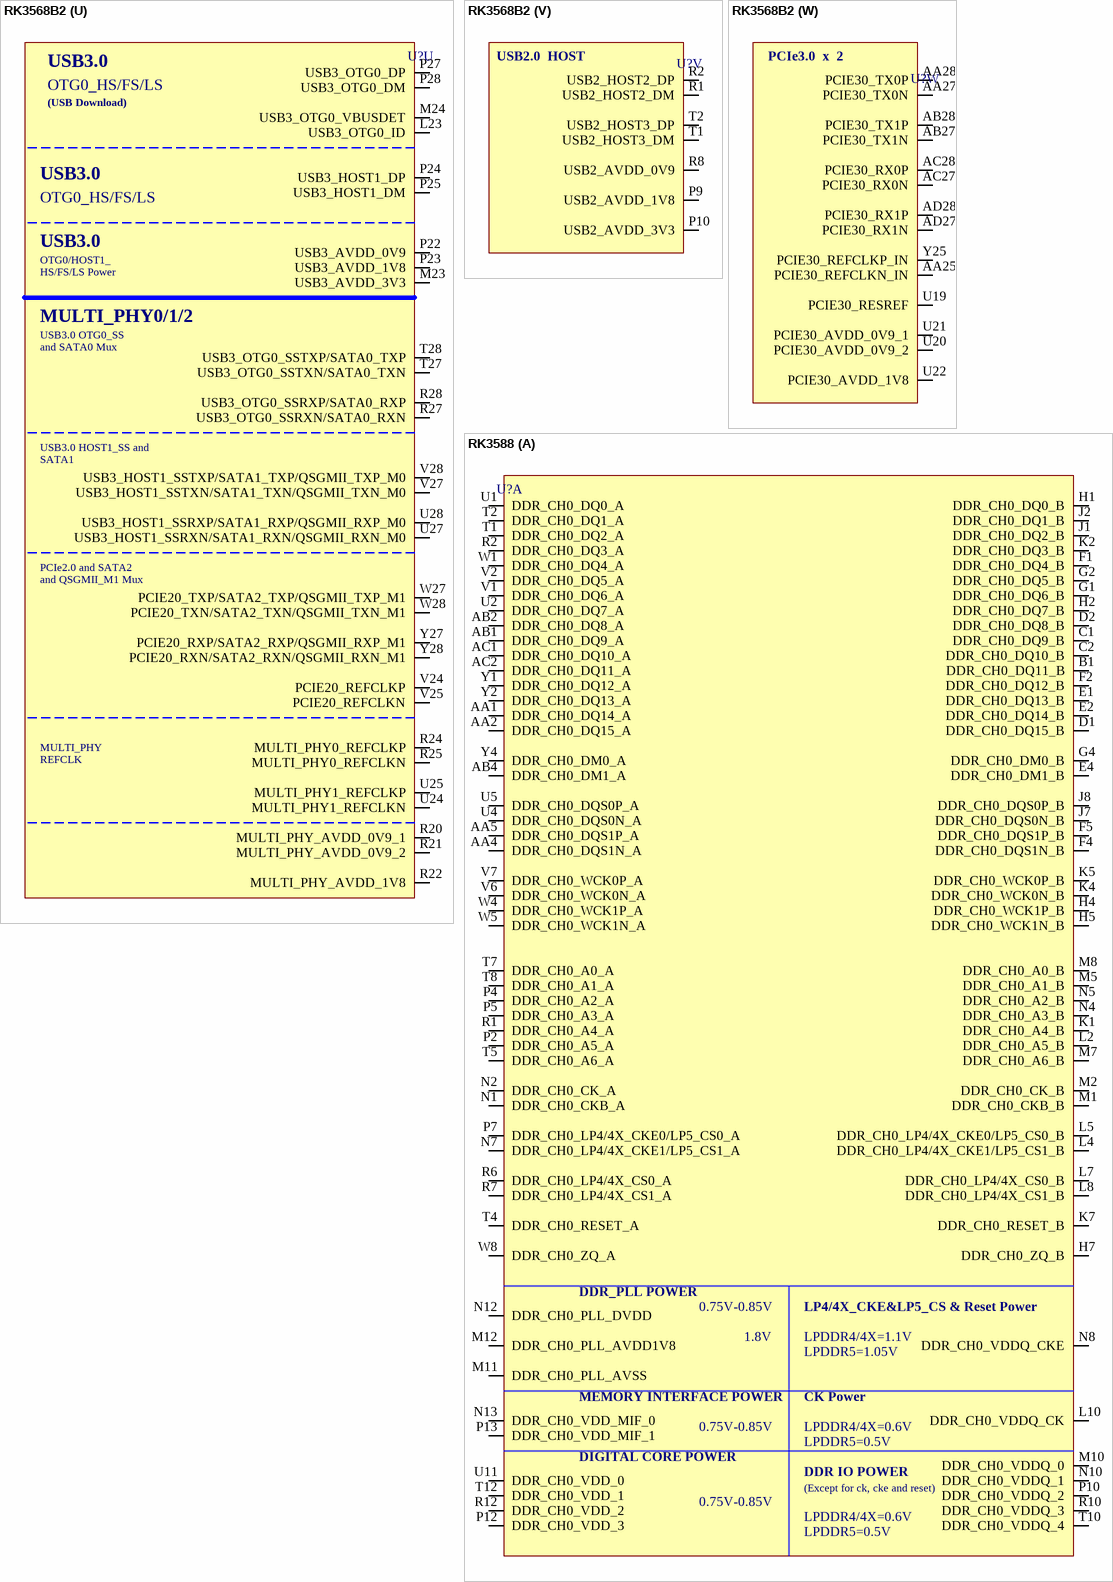
[diagram p18: symbols RK3568B2 to RK3588]